# Altium footprint library WR-TBL_Pluggable Connector_3.81mm.PcbLib: 201 footprints (part 2 of 13)
Each footprint in its own frame and in the unit in brackets; x right, y up, seen from the top. Pads: shape width x height; smd on the part's side, far side on the other; paste and mask are expansions set on the pad; w line width, h text height; cw(c..) or ccw(c..) is an arc to the next point about the centre after c.
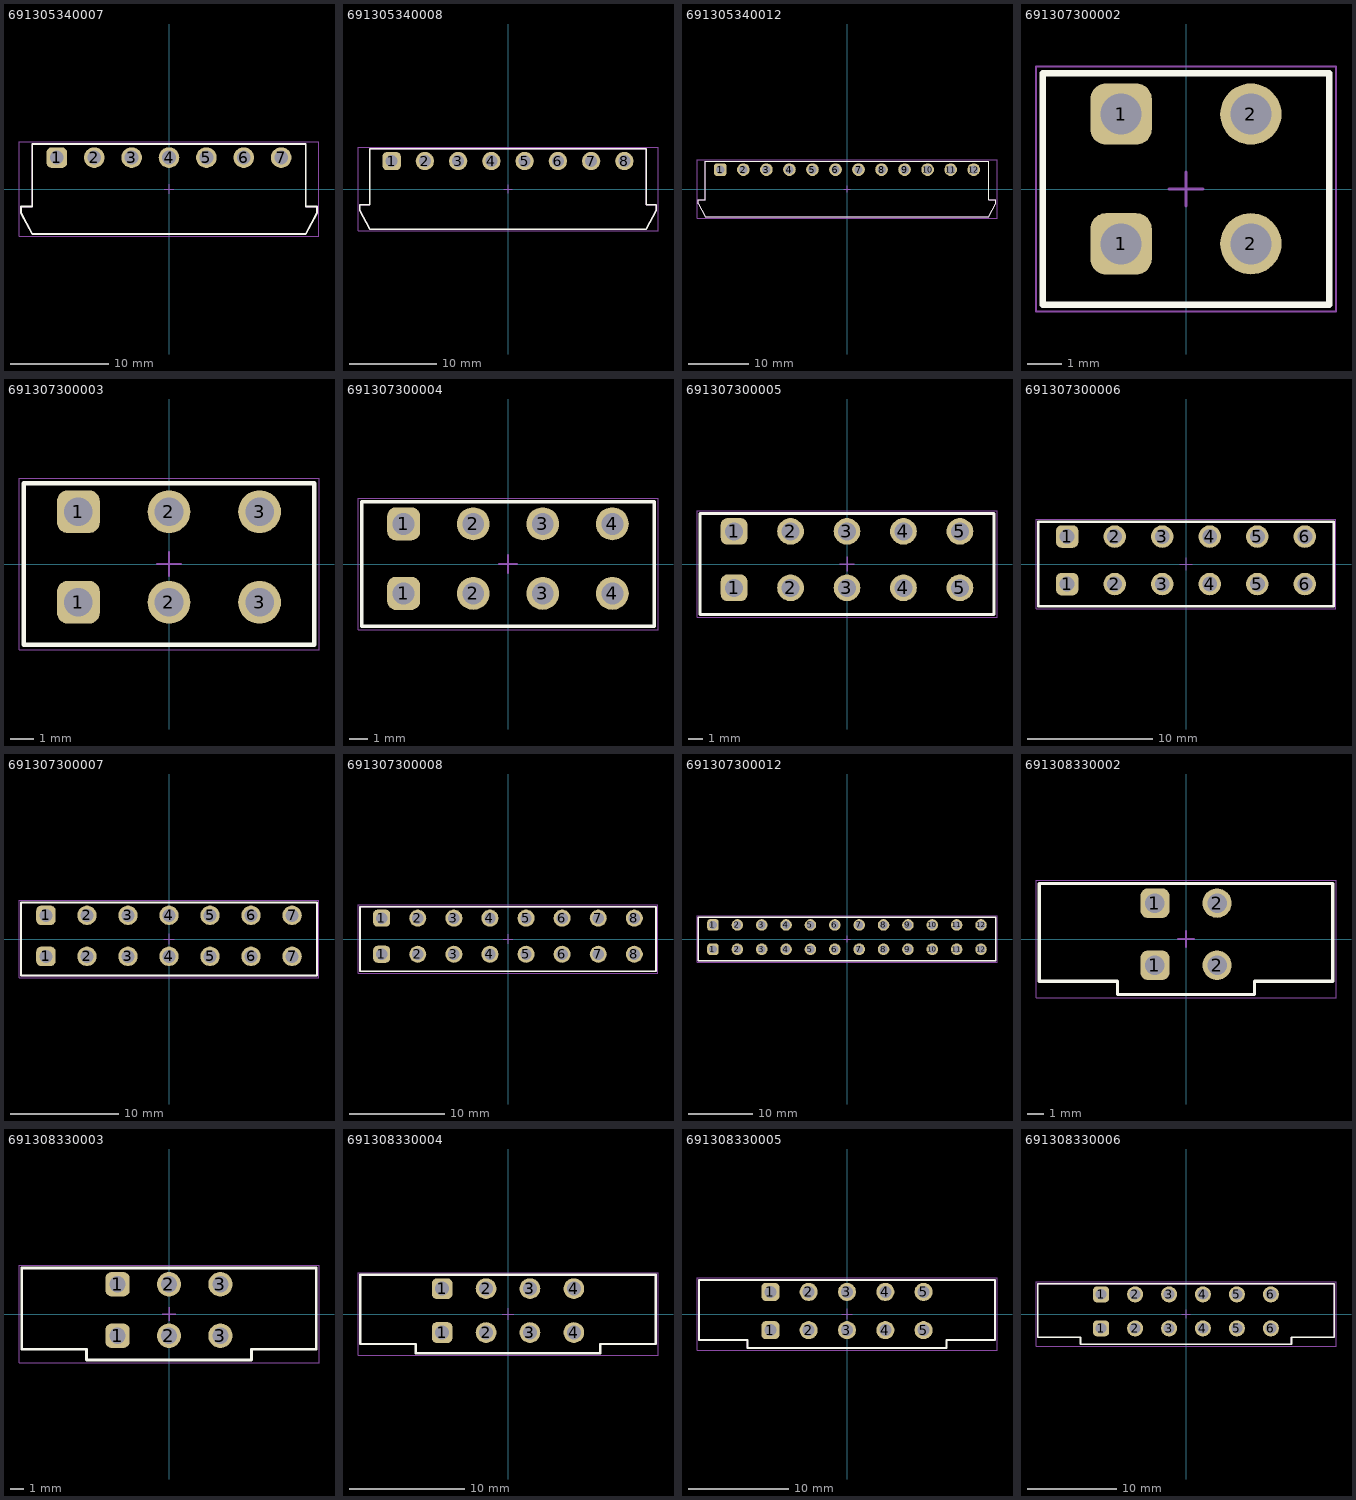
[diagram p1: the footprints below, top view; thin cyan lines are the x and y axes]

## 691305340007 [mm] "Horizontal PCB Header with Plastic Latch, pitch 3.81mm, 07p"
height 7
pads (7):
  rrect50% 2.1x2.1 hole 1.4: 1(-11.43,3.2)
  round 2.1 hole 1.4: 2(-7.62,3.2) 3(-3.81,3.2) 4(0,3.2) 5(3.81,3.2) 6(7.62,3.2) 7(11.43,3.2)
Top Overlay:
  lines w0.2: -15.087,-2.451 -13.935,-4.6 13.935,-4.6 15.087,-2.451 ; -15.085,-2.45 -15.085,-1.8 -13.935,-1.8 -13.935,4.6 13.935,4.6 13.935,-1.8 15.085,-1.8 15.085,-2.45
Top Assembly:
  lines w0.1: -15.087,-2.451 -13.935,-4.6 13.935,-4.6 15.087,-2.451 ; -15.085,-2.45 -15.085,-1.8 -13.935,-1.8 -13.935,4.6 13.935,4.6 13.935,-1.8 15.085,-1.8 15.085,-2.45
Top Designator:
  text ".Designator" at -3.647,-0.357 h1
Top 3D Body:
  lines w0.1: -15.087,-2.451 -13.935,-4.6 13.935,-4.6 15.087,-2.451 ; -15.085,-2.45 -15.085,-1.8 -13.935,-1.8 -13.935,4.6 13.935,4.6 13.935,-1.8 15.085,-1.8 15.085,-2.45
Top Courtyard:
  lines w0.05: -15.285,-4.8 -15.285,4.8 15.285,4.8 15.285,-4.8 -15.285,-4.8
Top Component Center:
  lines w0.1: -0.5,0 0.5,0 ; 0,-0.5 0,0.5
3D body "691305340007.stp": height 7.25, standoff -3.45, extent -15.08,-4.6 15.08,4.6

## 691305340008 [mm] "Horizontal PCB Header with Plastic Latch, pitch 3.81mm, 08p"
height 7
pads (8):
  rrect50% 2.1x2.1 hole 1.4: 1(-13.335,3.2)
  round 2.1 hole 1.4: 2(-9.525,3.2) 3(-5.715,3.2) 4(-1.905,3.2) 5(1.905,3.2) 6(5.715,3.2) 7(9.525,3.2) 8(13.335,3.2)
Top Overlay:
  lines w0.2: -16.992,-2.451 -15.84,-4.6 15.84,-4.6 16.992,-2.451 ; -16.99,-2.45 -16.99,-1.8 -15.84,-1.8 -15.84,4.6 15.84,4.6 15.84,-1.8 16.99,-1.8 16.99,-2.45
Top Assembly:
  lines w0.1: -16.992,-2.451 -15.84,-4.6 15.84,-4.6 16.992,-2.451 ; -16.99,-2.45 -16.99,-1.8 -15.84,-1.8 -15.84,4.6 15.84,4.6 15.84,-1.8 16.99,-1.8 16.99,-2.45
Top Designator:
  text ".Designator" at -3.647,-0.357 h1
Top 3D Body:
  lines w0.1: -16.992,-2.451 -15.84,-4.6 15.84,-4.6 16.992,-2.451 ; -16.99,-2.45 -16.99,-1.8 -15.84,-1.8 -15.84,4.6 15.84,4.6 15.84,-1.8 16.99,-1.8 16.99,-2.45
Top Courtyard:
  lines w0.05: -17.19,-4.8 17.19,-4.8 17.19,4.8 -17.19,4.8 -17.19,-4.8
Top Component Center:
  lines w0.1: -0.5,0 0.5,0 ; 0,-0.5 0,0.5
3D body "691305340008.stp": height 7.25, standoff -3.45, extent -16.985,-4.6 16.985,4.6

## 691305340012 [mm] "Horizontal PCB Header with Plastic Latch, pitch 3.81mm, 12p"
height 7
pads (12):
  rrect50% 2.1x2.1 hole 1.4: 1(-20.955,3.2)
  round 2.1 hole 1.4: 2(-17.145,3.2) 3(-13.335,3.2) 4(-9.525,3.2) 5(-5.715,3.2) 6(-1.905,3.2) 7(1.905,3.2) 8(5.715,3.2) 9(9.525,3.2) 10(13.335,3.2) 11(17.145,3.2) 12(20.955,3.2)
Top Overlay:
  lines w0.2: -24.612,-2.451 -23.46,-4.6 23.46,-4.6 24.612,-2.451 ; -24.61,-2.45 -24.61,-1.8 -23.46,-1.8 -23.46,4.6 23.46,4.6 23.46,-1.8 24.61,-1.8 24.61,-2.45
Top Assembly:
  lines w0.1: -24.612,-2.451 -23.46,-4.6 23.46,-4.6 24.612,-2.451 ; -24.61,-2.45 -24.61,-1.8 -23.46,-1.8 -23.46,4.6 23.46,4.6 23.46,-1.8 24.61,-1.8 24.61,-2.45
Top Designator:
  text ".Designator" at -3.647,-0.357 h1
Top 3D Body:
  lines w0.1: -24.612,-2.451 -23.46,-4.6 23.46,-4.6 24.612,-2.451 ; -24.61,-2.45 -24.61,-1.8 -23.46,-1.8 -23.46,4.6 23.46,4.6 23.46,-1.8 24.61,-1.8 24.61,-2.45
Top Courtyard:
  lines w0.05: -24.81,-4.8 24.81,-4.8 24.81,4.8 -24.81,4.8 -24.81,-4.8
Top Component Center:
  lines w0.1: -0.5,0 0.5,0 ; 0,-0.5 0,0.5
3D body "691305340012.stp": height 7.25, standoff -3.45, extent -24.605,-4.6 24.605,4.6

## 691307300002 [mm] "Vertical Reserved PCB Header, pitch 3.81mm, 02p"
height 14.5
pads (4):
  rrect50% 1.8x1.8 hole 1.2: 1(-1.905,-1.61) 1(-1.905,2.2)
  round 1.8 hole 1.2: 2(1.905,-1.61) 2(1.905,2.2)
Top Overlay:
  lines w0.2: -4.205,-3.4 -4.205,3.4 4.205,3.4 4.205,-3.4 -4.205,-3.4
Top Assembly:
  lines w0.1: -4.205,-3.4 4.205,-3.4 4.205,3.4 -4.205,3.4 -4.205,-3.4
Top Designator:
  text ".Designator" at -3.647,-0.357 h1
Top 3D Body:
  lines w0.1: -4.205,-3.4 -4.205,3.4 4.205,3.4 4.205,-3.4 -4.205,-3.4
Top Courtyard:
  lines w0.05: -4.405,-3.6 4.405,-3.6 4.405,3.6 -4.405,3.6 -4.405,-3.6
Top Component Center:
  lines w0.1: -0.5,0 0.5,0 ; 0,-0.5 0,0.5
3D body "691307300002.stp": height 14.6, standoff -3.3, extent -4.205,-3.4 4.205,3.4

## 691307300003 [mm] "Vertical Reserved PCB Header, pitch 3.81mm, 03p"
height 14.5
pads (6):
  rrect50% 1.8x1.8 hole 1.2: 1(-3.81,-1.61) 1(-3.81,2.2)
  round 1.8 hole 1.2: 2(0,-1.61) 2(0,2.2) 3(3.81,-1.61) 3(3.81,2.2)
Top Overlay:
  lines w0.2: -6.11,-3.4 6.11,-3.4 6.11,3.4 -6.11,3.4 -6.11,-3.4
Top Assembly:
  lines w0.1: -6.11,-3.4 -6.11,3.4 6.11,3.4 6.11,-3.4 -6.11,-3.4
Top Designator:
  text ".Designator" at -3.647,-0.357 h1
Top 3D Body:
  lines w0.1: -6.11,-3.4 6.11,-3.4 6.11,3.4 -6.11,3.4 -6.11,-3.4
Top Courtyard:
  lines w0.05: -6.31,-3.6 -6.31,3.6 6.31,3.6 6.31,-3.6 -6.31,-3.6
Top Component Center:
  lines w0.1: -0.5,0 0.5,0 ; 0,-0.5 0,0.5
3D body "691307300003.stp": height 14.6, standoff -3.3, extent -6.11,-3.4 6.11,3.4

## 691307300004 [mm] "Vertical Reserved PCB Header, pitch 3.81mm, 04p"
height 14.5
pads (8):
  rrect50% 1.8x1.8 hole 1.2: 1(-5.715,-1.61) 1(-5.715,2.2)
  round 1.8 hole 1.2: 2(-1.905,-1.61) 2(-1.905,2.2) 3(1.905,-1.61) 3(1.905,2.2) 4(5.715,-1.61) 4(5.715,2.2)
Top Overlay:
  lines w0.2: -8.015,-3.4 8.015,-3.4 8.015,3.4 -8.015,3.4 -8.015,-3.4
Top Assembly:
  lines w0.1: -8.015,-3.4 -8.015,3.4 8.015,3.4 8.015,-3.4 -8.015,-3.4
Top Designator:
  text ".Designator" at -3.647,-0.357 h1
Top 3D Body:
  lines w0.1: -8.015,-3.4 8.015,-3.4 8.015,3.4 -8.015,3.4 -8.015,-3.4
Top Courtyard:
  lines w0.05: -8.215,-3.6 -8.215,3.6 8.215,3.6 8.215,-3.6 -8.215,-3.6
Top Component Center:
  lines w0.1: -0.5,0 0.5,0 ; 0,-0.5 0,0.5
3D body "691307300004.stp": height 14.6, standoff -3.3, extent -8.015,-3.4 8.015,3.4

## 691307300005 [mm] "Vertical Reserved PCB Header, pitch 3.81mm, 05p"
height 14.5
pads (10):
  rrect50% 1.8x1.8 hole 1.2: 1(-7.62,-1.61) 1(-7.62,2.2)
  round 1.8 hole 1.2: 2(-3.81,-1.61) 2(-3.81,2.2) 3(0,-1.61) 3(0,2.2) 4(3.81,-1.61) 4(3.81,2.2) 5(7.62,-1.61) 5(7.62,2.2)
Top Overlay:
  lines w0.2: -9.92,-3.4 -9.92,3.4 9.92,3.4 9.92,-3.4 -9.92,-3.4
Top Assembly:
  lines w0.1: -9.92,-3.4 9.92,-3.4 9.92,3.4 -9.92,3.4 -9.92,-3.4
Top Designator:
  text ".Designator" at -3.647,-0.357 h1
Top 3D Body:
  lines w0.1: -9.92,-3.4 -9.92,3.4 9.92,3.4 9.92,-3.4 -9.92,-3.4
Top Courtyard:
  lines w0.05: -10.12,-3.6 10.12,-3.6 10.12,3.6 -10.12,3.6 -10.12,-3.6
Top Component Center:
  lines w0.1: -0.5,0 0.5,0 ; 0,-0.5 0,0.5
3D body "691307300005.stp": height 14.6, standoff -3.3, extent -9.92,-3.4 9.92,3.4

## 691307300006 [mm] "Vertical Reserved PCB Header, pitch 3.81mm, 06p"
height 14.5
pads (12):
  rrect50% 1.8x1.8 hole 1.2: 1(-9.525,-1.61) 1(-9.525,2.2)
  round 1.8 hole 1.2: 2(-5.715,-1.61) 2(-5.715,2.2) 3(-1.905,-1.61) 3(-1.905,2.2) 4(1.905,-1.61) 4(1.905,2.2) 5(5.715,-1.61) 5(5.715,2.2) 6(9.525,-1.61) 6(9.525,2.2)
Top Overlay:
  lines w0.2: -11.825,-3.4 -11.825,3.4 11.825,3.4 11.825,-3.4 -11.825,-3.4
Top Assembly:
  lines w0.1: -11.825,-3.4 11.825,-3.4 11.825,3.4 -11.825,3.4 -11.825,-3.4
Top Designator:
  text ".Designator" at -3.647,-0.357 h1
Top 3D Body:
  lines w0.1: -11.825,-3.4 -11.825,3.4 11.825,3.4 11.825,-3.4 -11.825,-3.4
Top Courtyard:
  lines w0.05: -12.025,-3.6 12.025,-3.6 12.025,3.6 -12.025,3.6 -12.025,-3.6
Top Component Center:
  lines w0.1: -0.5,0 0.5,0 ; 0,-0.5 0,0.5
3D body "691307300006.stp": height 14.6, standoff -3.3, extent -11.825,-3.4 11.825,3.4

## 691307300007 [mm] "Vertical Reserved PCB Header, pitch 3.81mm, 07p"
height 14.5
pads (14):
  rrect50% 1.8x1.8 hole 1.2: 1(-11.43,-1.61) 1(-11.43,2.2)
  round 1.8 hole 1.2: 2(-7.62,-1.61) 2(-7.62,2.2) 3(-3.81,-1.61) 3(-3.81,2.2) 4(0,-1.61) 4(0,2.2) 5(3.81,-1.61) 5(3.81,2.2) 6(7.62,-1.61) 6(7.62,2.2) 7(11.43,-1.61) 7(11.43,2.2)
Top Overlay:
  lines w0.2: -13.73,-3.4 13.73,-3.4 13.73,3.4 -13.73,3.4 -13.73,-3.4
Top Assembly:
  lines w0.1: -13.73,-3.4 -13.73,3.4 13.73,3.4 13.73,-3.4 -13.73,-3.4
Top Designator:
  text ".Designator" at -3.647,-0.357 h1
Top 3D Body:
  lines w0.1: -13.73,-3.4 13.73,-3.4 13.73,3.4 -13.73,3.4 -13.73,-3.4
Top Courtyard:
  lines w0.05: -13.93,-3.6 -13.93,3.6 13.93,3.6 13.93,-3.6 -13.93,-3.6
Top Component Center:
  lines w0.1: -0.5,0 0.5,0 ; 0,-0.5 0,0.5
3D body "691307300007.stp": height 14.6, standoff -3.3, extent -13.73,-3.4 13.73,3.4

## 691307300008 [mm] "Vertical Reserved PCB Header, pitch 3.81mm, 08p"
height 14.5
pads (16):
  rrect50% 1.8x1.8 hole 1.2: 1(-13.335,-1.61) 1(-13.335,2.2)
  round 1.8 hole 1.2: 2(-9.525,-1.61) 2(-9.525,2.2) 3(-5.715,-1.61) 3(-5.715,2.2) 4(-1.905,-1.61) 4(-1.905,2.2) 5(1.905,-1.61) 5(1.905,2.2) 6(5.715,-1.61) 6(5.715,2.2) 7(9.525,-1.61) 7(9.525,2.2) 8(13.335,-1.61) 8(13.335,2.2)
Top Overlay:
  lines w0.2: -15.635,-3.4 15.635,-3.4 15.635,3.4 -15.635,3.4 -15.635,-3.4
Top Assembly:
  lines w0.1: -15.635,-3.4 -15.635,3.4 15.635,3.4 15.635,-3.4 -15.635,-3.4
Top Designator:
  text ".Designator" at -3.647,-0.357 h1
Top 3D Body:
  lines w0.1: -15.635,-3.4 15.635,-3.4 15.635,3.4 -15.635,3.4 -15.635,-3.4
Top Courtyard:
  lines w0.05: -15.835,-3.6 -15.835,3.6 15.835,3.6 15.835,-3.6 -15.835,-3.6
Top Component Center:
  lines w0.1: -0.5,0 0.5,0 ; 0,-0.5 0,0.5
3D body "691307300008.stp": height 14.6, standoff -3.3, extent -15.635,-3.4 15.635,3.4

## 691307300012 [mm] "Vertical Reserved PCB Header, pitch 3.81mm, 12p"
height 14.5
pads (24):
  rrect50% 1.8x1.8 hole 1.2: 1(-20.955,-1.61) 1(-20.955,2.2)
  round 1.8 hole 1.2: 2(-17.145,-1.61) 2(-17.145,2.2) 3(-13.335,-1.61) 3(-13.335,2.2) 4(-9.525,-1.61) 4(-9.525,2.2) 5(-5.715,-1.61) 5(-5.715,2.2) 6(-1.905,-1.61) 6(-1.905,2.2) 7(1.905,-1.61) 7(1.905,2.2) 8(5.715,-1.61) 8(5.715,2.2) 9(9.525,-1.61) 9(9.525,2.2) 10(13.335,-1.61) 10(13.335,2.2) 11(17.145,-1.61) 11(17.145,2.2) 12(20.955,-1.61) 12(20.955,2.2)
Top Overlay:
  lines w0.2: -23.255,-3.4 23.255,-3.4 23.255,3.4 -23.255,3.4 -23.255,-3.4
Top Assembly:
  lines w0.1: -23.255,-3.4 -23.255,3.4 23.255,3.4 23.255,-3.4 -23.255,-3.4
Top Designator:
  text ".Designator" at -3.647,-0.357 h1
Top 3D Body:
  lines w0.1: -23.255,-3.4 23.255,-3.4 23.255,3.4 -23.255,3.4 -23.255,-3.4
Top Courtyard:
  lines w0.05: -23.455,-3.6 -23.455,3.6 23.455,3.6 23.455,-3.6 -23.455,-3.6
Top Component Center:
  lines w0.1: -0.5,0 0.5,0 ; 0,-0.5 0,0.5
3D body "691307300012.stp": height 14.6, standoff -3.3, extent -23.255,-3.4 23.255,3.4

## 691308330002 [mm] "Vertical Reserved PCB Header with Flanges, pitch 3.81mm, 02p"
height 14.5
pads (4):
  rrect50% 1.8x1.8 hole 1.2: 1(-1.905,-1.61) 1(-1.905,2.2)
  round 1.8 hole 1.2: 2(1.905,-1.61) 2(1.905,2.2)
Top Overlay:
  lines w0.2: -9.005,-2.6 -9.005,3.4 9.005,3.4 9.005,-2.6 4.2,-2.6 4.2,-3.4 -4.2,-3.4 -4.2,-2.6 -9.005,-2.6
Top Assembly:
  lines w0.1: -9.005,-2.6 -4.2,-2.6 -4.2,-3.4 4.2,-3.4 4.2,-2.6 9.005,-2.6 9.005,3.4 -9.005,3.4 -9.005,-2.6
Top Designator:
  text ".Designator" at -3.647,-0.357 h1
Top 3D Body:
  lines w0.1: -9.005,-2.6 -9.005,3.4 9.005,3.4 9.005,-2.6 4.2,-2.6 4.2,-3.4 -4.2,-3.4 -4.2,-2.6 -9.005,-2.6
Top Courtyard:
  lines w0.05: -9.205,-3.6 -9.205,3.6 9.205,3.6 9.205,-3.6 -9.205,-3.6
Top Component Center:
  lines w0.1: -0.5,0 0.5,0 ; 0,-0.5 0,0.5
3D body "691308330002.stp": height 14.6, standoff -3.3, extent -9.005,-3.4 9.005,3.4

## 691308330003 [mm] "Vertical Reserved PCB Header with Flanges, pitch 3.81mm, 03p"
height 14.5
pads (6):
  rrect50% 1.8x1.8 hole 1.2: 1(-3.81,-1.61) 1(-3.81,2.2)
  round 1.8 hole 1.2: 2(0,-1.61) 2(0,2.2) 3(3.81,-1.61) 3(3.81,2.2)
Top Overlay:
  lines w0.2: -10.91,-2.6 -6.105,-2.6 -6.105,-3.4 6.105,-3.4 6.105,-2.6 10.91,-2.6 10.91,3.4 -10.91,3.4 -10.91,-2.6
Top Assembly:
  lines w0.1: -10.91,-2.6 -10.91,3.4 10.91,3.4 10.91,-2.6 6.105,-2.6 6.105,-3.4 -6.105,-3.4 -6.105,-2.6 -10.91,-2.6
Top Designator:
  text ".Designator" at -3.647,-0.357 h1
Top 3D Body:
  lines w0.1: -10.91,-2.6 -6.105,-2.6 -6.105,-3.4 6.105,-3.4 6.105,-2.6 10.91,-2.6 10.91,3.4 -10.91,3.4 -10.91,-2.6
Top Courtyard:
  lines w0.05: -11.11,-3.6 11.11,-3.6 11.11,3.6 -11.11,3.6 -11.11,-3.6
Top Component Center:
  lines w0.1: -0.5,0 0.5,0 ; 0,-0.5 0,0.5
3D body "691308330003.stp": height 14.6, standoff -3.3, extent -10.91,-3.4 10.91,3.4

## 691308330004 [mm] "Vertical Reserved PCB Header with Flanges, pitch 3.81mm, 04p"
height 14.5
pads (8):
  rrect50% 1.8x1.8 hole 1.2: 1(-5.715,-1.61) 1(-5.715,2.2)
  round 1.8 hole 1.2: 2(-1.905,-1.61) 2(-1.905,2.2) 3(1.905,-1.61) 3(1.905,2.2) 4(5.715,-1.61) 4(5.715,2.2)
Top Overlay:
  lines w0.2: -12.815,-2.6 -8.01,-2.6 -8.01,-3.4 8.01,-3.4 8.01,-2.6 12.815,-2.6 12.815,3.4 -12.815,3.4 -12.815,-2.6
Top Assembly:
  lines w0.1: -12.815,-2.6 -12.815,3.4 12.815,3.4 12.815,-2.6 8.01,-2.6 8.01,-3.4 -8.01,-3.4 -8.01,-2.6 -12.815,-2.6
Top Designator:
  text ".Designator" at -3.647,-0.357 h1
Top 3D Body:
  lines w0.1: -12.815,-2.6 -8.01,-2.6 -8.01,-3.4 8.01,-3.4 8.01,-2.6 12.815,-2.6 12.815,3.4 -12.815,3.4 -12.815,-2.6
Top Courtyard:
  lines w0.05: -13.015,-3.6 13.015,-3.6 13.015,3.6 -13.015,3.6 -13.015,-3.6
Top Component Center:
  lines w0.1: -0.5,0 0.5,0 ; 0,-0.5 0,0.5
3D body "691308330004.stp": height 14.6, standoff -3.3, extent -12.815,-3.4 12.815,3.4

## 691308330005 [mm] "Vertical Reserved PCB Header with Flanges, pitch 3.81mm, 05p"
height 14.5
pads (10):
  rrect50% 1.8x1.8 hole 1.2: 1(-7.62,-1.61) 1(-7.62,2.2)
  round 1.8 hole 1.2: 2(-3.81,-1.61) 2(-3.81,2.2) 3(0,-1.61) 3(0,2.2) 4(3.81,-1.61) 4(3.81,2.2) 5(7.62,-1.61) 5(7.62,2.2)
Top Overlay:
  lines w0.2: -14.72,-2.6 -9.915,-2.6 -9.915,-3.4 9.915,-3.4 9.915,-2.6 14.72,-2.6 14.72,3.4 -14.72,3.4 -14.72,-2.6
Top Assembly:
  lines w0.1: -14.72,-2.6 -14.72,3.4 14.72,3.4 14.72,-2.6 9.915,-2.6 9.915,-3.4 -9.915,-3.4 -9.915,-2.6 -14.72,-2.6
Top Designator:
  text ".Designator" at -3.647,-0.357 h1
Top 3D Body:
  lines w0.1: -14.72,-2.6 -9.915,-2.6 -9.915,-3.4 9.915,-3.4 9.915,-2.6 14.72,-2.6 14.72,3.4 -14.72,3.4 -14.72,-2.6
Top Courtyard:
  lines w0.05: -14.92,-3.6 14.92,-3.6 14.92,3.6 -14.92,3.6 -14.92,-3.6
Top Component Center:
  lines w0.1: -0.5,0 0.5,0 ; 0,-0.5 0,0.5
3D body "691308330005.stp": height 14.6, standoff -3.3, extent -14.72,-3.4 14.72,3.4

## 691308330006 [mm] "Vertical Reserved PCB Header with Flanges, pitch 3.81mm, 06p"
height 14.5
pads (12):
  rrect50% 1.8x1.8 hole 1.2: 1(-9.525,-1.61) 1(-9.525,2.2)
  round 1.8 hole 1.2: 2(-5.715,-1.61) 2(-5.715,2.2) 3(-1.905,-1.61) 3(-1.905,2.2) 4(1.905,-1.61) 4(1.905,2.2) 5(5.715,-1.61) 5(5.715,2.2) 6(9.525,-1.61) 6(9.525,2.2)
Top Overlay:
  lines w0.2: -16.625,-2.6 -11.82,-2.6 -11.82,-3.4 11.82,-3.4 11.82,-2.6 16.625,-2.6 16.625,3.4 -16.625,3.4 -16.625,-2.6
Top Assembly:
  lines w0.1: -16.625,-2.6 -16.625,3.4 16.625,3.4 16.625,-2.6 11.82,-2.6 11.82,-3.4 -11.82,-3.4 -11.82,-2.6 -16.625,-2.6
Top Designator:
  text ".Designator" at -3.647,-0.357 h1
Top 3D Body:
  lines w0.1: -16.625,-2.6 -11.82,-2.6 -11.82,-3.4 11.82,-3.4 11.82,-2.6 16.625,-2.6 16.625,3.4 -16.625,3.4 -16.625,-2.6
Top Courtyard:
  lines w0.05: -16.825,-3.6 16.825,-3.6 16.825,3.6 -16.825,3.6 -16.825,-3.6
Top Component Center:
  lines w0.1: -0.5,0 0.5,0 ; 0,-0.5 0,0.5
3D body "691308330006.stp": height 14.6, standoff -3.3, extent -16.625,-3.4 16.625,3.4